# Altium schematic symbol library C1210C226J8RAC7800.SchLib: 1 symbol
Pins are listed as number, name and electrical type; pins without a type are passive.

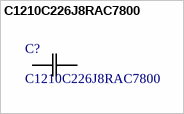
[diagram p0: symbol C1210C226J8RAC7800]

## C1210C226J8RAC7800
designator C?
No Description Available; Manufacturer_Name: Kemet; Copyright: Copyright (C) 2026 Ultra Librarian. All rights reserved.; Manufacturer_Part_Number: C1210C226J8RAC7800
footprint CAP_C1210C_X7R_FS_KEM
pins: 1, 2